# Altium footprint library Demo.PcbLib: 4 footprints
Each footprint in its own frame and in the unit in brackets; x right, y up, seen from the top. Pads: shape width x height; smd on the part's side, far side on the other; paste and mask are expansions set on the pad; w line width, h text height; cw(c..) or ccw(c..) is an arc to the next point about the centre after c.
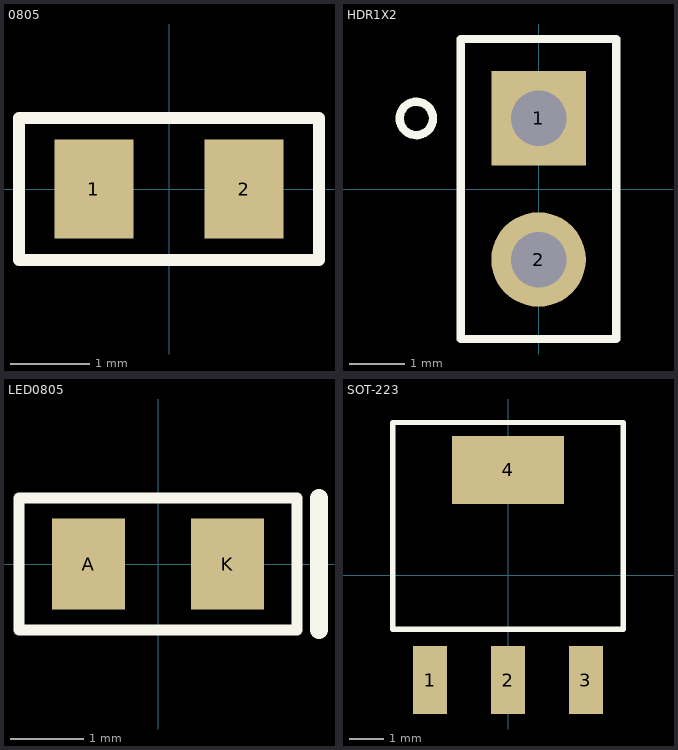
[diagram p0: the footprints below, top view; thin cyan lines are the x and y axes]

## 0805 [mm] "Chip, 0805 (2012 metric)"
height 1.016
pads (2):
  rect 1x1.25 smd: 1(-0.95,0) 2(0.95,0)
Top Overlay:
  lines w0.15: -1.9,-0.9 1.9,-0.9 1.9,0.9 -1.9,0.9 -1.9,-0.9

## HDR1X2 [mm] "Header, 2-Pin, 2.54 mm"
height 8.382
pads (2):
  rect 1.7x1.7 hole 1: 1(0,1.27)
  round 1.7 hole 1: 2(0,-1.27)
Top Overlay:
  circle w0.15: c-2.2,1.27 r0.3
  lines w0.15: -1.4,-2.7 1.4,-2.7 1.4,2.7 -1.4,2.7 -1.4,-2.7

## LED0805 [mm] "Chip LED, 0805; bar marks the cathode"
height 1.016
pads (2):
  rect 1x1.25 smd: A(-0.95,0) K(0.95,0)
Top Overlay:
  lines w0.15: -1.9,-0.9 1.9,-0.9 1.9,0.9 -1.9,0.9 -1.9,-0.9
  lines w0.25: 2.2,-0.9 2.2,0.9

## SOT-223 [mm] "SOT-223, 3 leads and tab"
height 1.778
pads (4):
  rect 1x2 smd: 1(-2.3,-3.1) 2(0,-3.1) 3(2.3,-3.1)
  rect 3.3x2 smd: 4(0,3.1)
Top Overlay:
  lines w0.15: -3.4,-1.6 3.4,-1.6 3.4,4.5 -3.4,4.5 -3.4,-1.6